# Altium schematic symbol library Regulator.SchLib: 250 symbols (part 6 of 6)
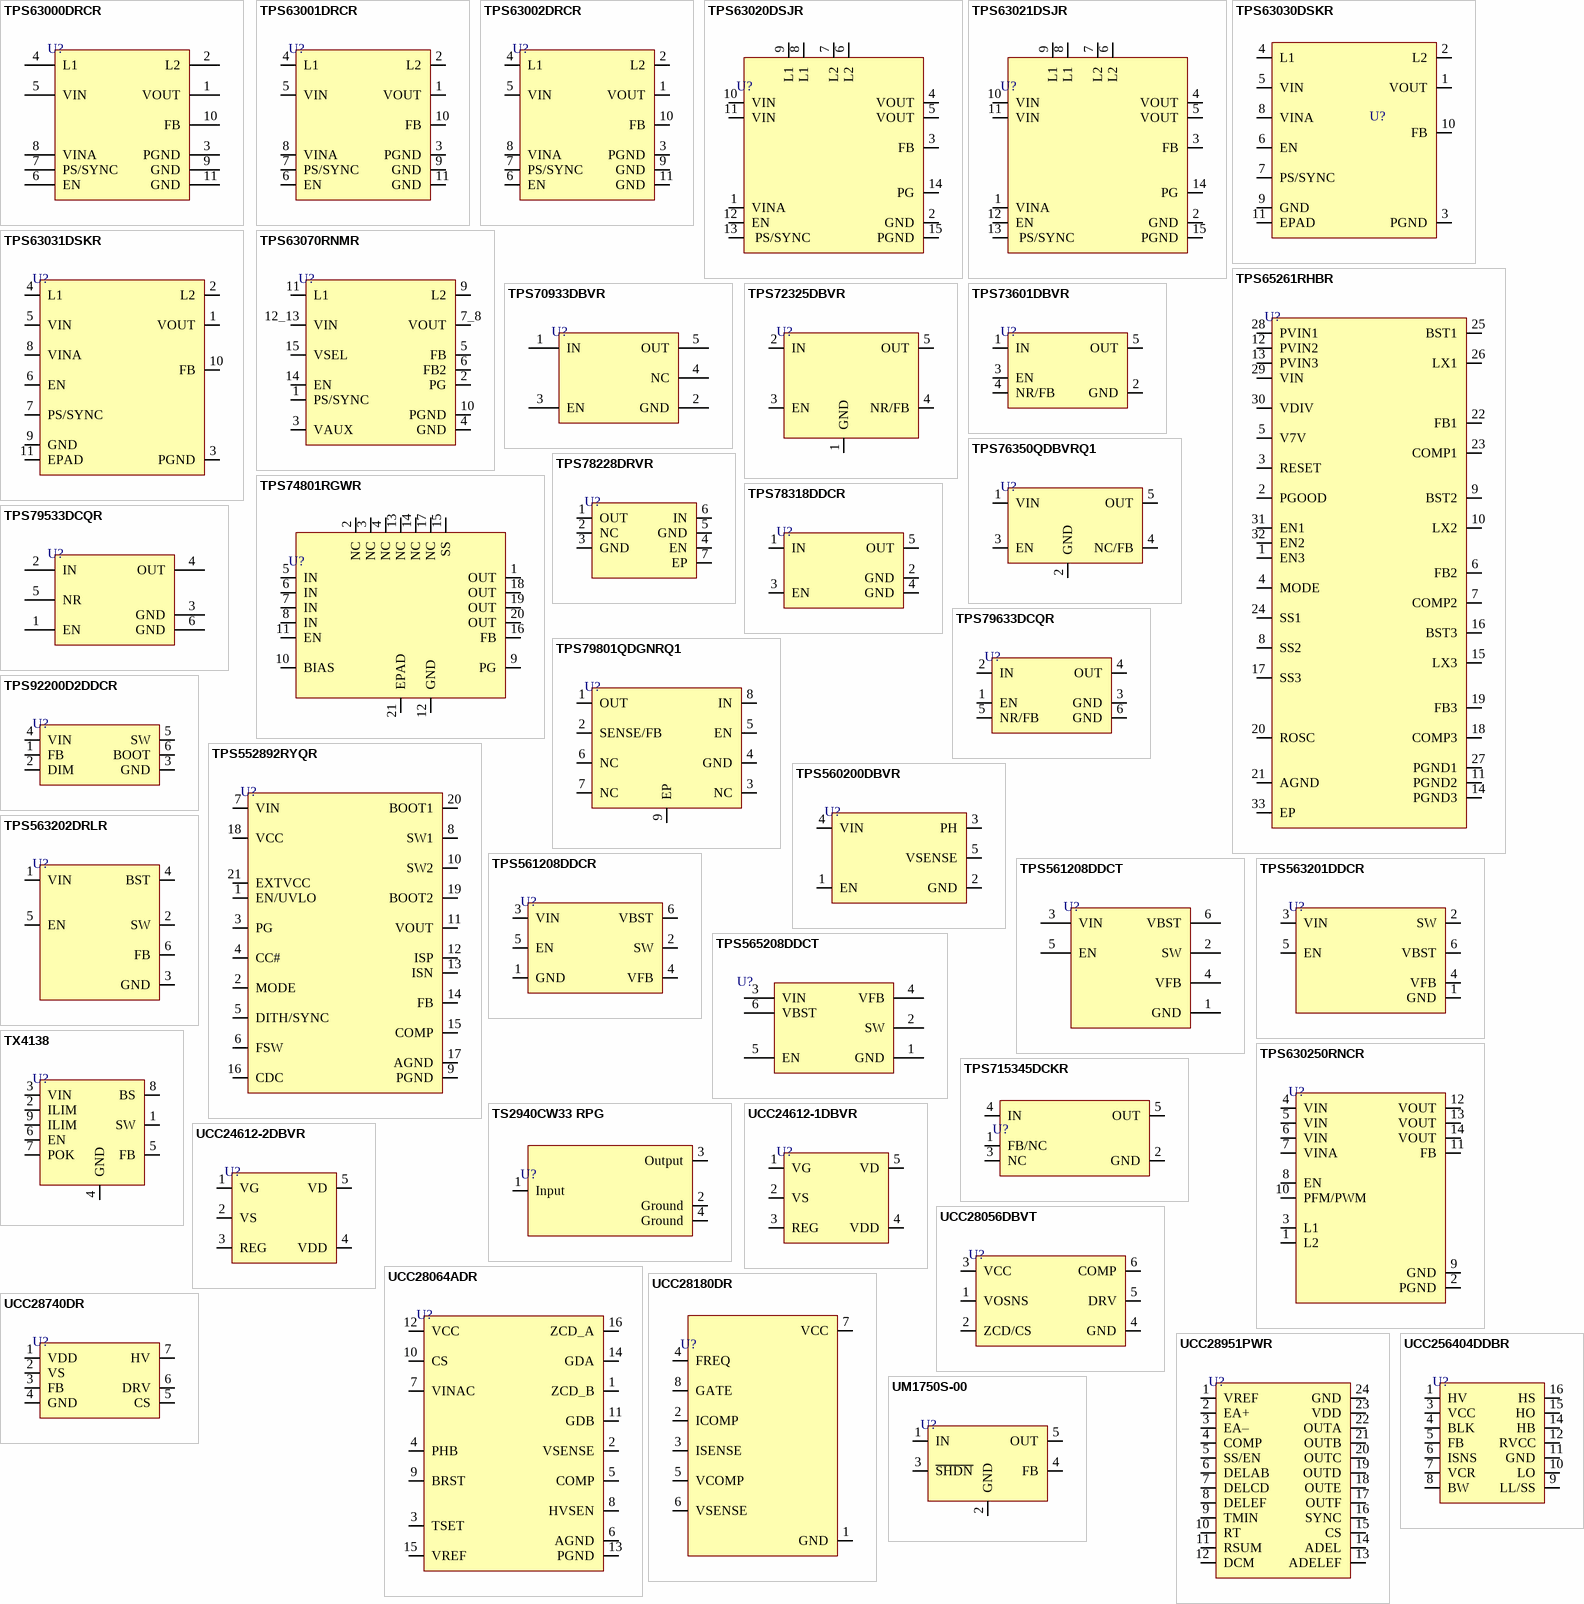
[diagram p11: symbols TPS63000DRCR to UM1750S-00]

## TPS63030DSKR
designator U?
IC REG BUCK-BST ADJ 900MA 10SON; Manufacturer: Texas Instruments; Manufacturer Part Number: TPS63030DSKR; Output Voltage: 5.5V; Output Current: 800mA; Min Input Voltage: 1.8V; Number of Outputs: 1; Switching Frequency: 2.4MHz; Synchronous Rectifier: Yes; Quiescent Current: 25uA; Output Type: Adjustable; Efficiency: 96%; Min Output Voltage: 1.2V; Topology: Buck-Boost; Output Configuration: Positive; Supply Current: 50uA; Supplier: Mouser; LCSC Part Number: C12462; RoHS: Yes; Item Type: IC; Stock: 10906; Pricing: 1=1.91, 10=1.64, 50=1.64, 100=1.41, 1000=1.01, 10000=0.886 (USD); Mounting Technology: Surface Mount; Case/Package: SON; Pins: 10; Min Operating Temperature: -40°C; Max Operating Temperature: 85°C; Packaging: Tape and Reel; Package Quantity: 3000; Max Output current: 800mA; Max Supply Voltage: 5.5V; Operating Supply Voltage: 5.5V; Series: -; Min Supply Voltage: 1.8V; Max Output Voltage: 5.5V; Radiation Hardening: No; Lead Free: Lead Free; RoHS Compliant: Yes; Reach SVHC Compliant: No; ComponentLink1URL: https://datasheet.ciiva.com/15113/getdatasheetpartid-188355-15113767.pdf?src-supplier=Verical; ComponentLink1Description: https://datasheet.ciiva.com/15113/getdatasheetpartid-188355-15113767.pdf?src-supplier=Verical; ComponentLink2URL: https://datasheet.ciiva.com/3221/tps63030-3221511.pdf?src-supplier=Avnet; ComponentLink2Description: https://datasheet.ciiva.com/3221/tps63030-3221511.pdf?src-supplier=Avnet
footprint SON-10-EP(2.5x2.5)
pins: 1 VOUT, 2 L2, 3 PGND, 4 L1, 5 VIN, 6 EN, 7 PS/SYNC, 8 VINA, 9 GND, 10 FB, 11 EPAD

## TPS63031DSKR
designator U?
IC REG BUCK BST 3.3V 0.9A 10SON; Manufacturer: Texas Instruments; Manufacturer Part Number: TPS63031DSKR; Supplier: Digikey; LCSC Part Number: 296-39461-1-ND; RoHS: Yes; Item Type: IC; Stock: 6304; Pricing: 1=2.06, 10=1.847, 25=1.7424, 100=1.4844, 250=1.3938, 500=1.21958, 1000=1.0105 (USD); ComponentLink1URL: https://datasheet.ciiva.com/2034/tps63030-2034702.pdf?src-supplier=Digikey; ComponentLink1Description: https://datasheet.ciiva.com/2034/tps63030-2034702.pdf?src-supplier=Digikey; ComponentLink2URL: https://datasheet.ciiva.com/3221/tps63030-3221513.pdf?src-supplier=Avnet; ComponentLink2Description: https://datasheet.ciiva.com/3221/tps63030-3221513.pdf?src-supplier=Avnet
footprint SON-10-EP(2.5x2.5)
pins: 1 VOUT, 2 L2, 3 PGND, 4 L1, 5 VIN, 6 EN, 7 PS/SYNC, 8 VINA, 9 GND, 10 FB, 11 EPAD

## TPS63070RNMR
designator U?
IC REG BCK BST ADJ 3.6A 15VQFN; Manufacturer: Texas Instruments; Manufacturer Part Number: TPS63070RNMR; Supplier: Mouser; Supplier Part Number: 595-TPS63070RNMR; RoHS: Yes; Category: Voltage Regulators - Switching; Stock: 55982; Pricing: 1=2.7, 10=2.29, 50=2.29, 100=1.99, 1000=1.43, 10000=1.21 (USD); ComponentLink1URL: http://www.ti.com/lit/ds/symlink/tps63070.pdf?src-supplier=Digi-Key; ComponentLink1Description: http://www.ti.com/lit/ds/symlink/tps63070.pdf?src-supplier=Digi-Key; ComponentLink2URL: http://www.ti.com/lit/ds/symlink/tps63070.pdf?src-supplier=Farnell; ComponentLink2Description: http://www.ti.com/lit/ds/symlink/tps63070.pdf?src-supplier=Farnell; LCSC Part Number: C109322; Item Type: IC
footprint VQFN-15-HR(2.5x3)
pins: 1 PS/SYNC, 2 PG, 3 VAUX, 4 GND, 5 FB, 6 FB2, 7_8 VOUT, 9 L2, 10 PGND, 11 L1, 12_13 VIN, 14 EN, 15 VSEL

## TPS65261RHBR
designator U?
IC REG BCK ADJ 3A/2A TRPL 32VQFN; Manufacturer: Texas Instruments; Manufacturer Part Number: TPS65261RHBR; Supplier: Mouser; LCSC Part Number: C138722; RoHS: Yes; Item Type: IC; Stock: 3449; Pricing: 1=2.78, 10=1.91, 50=1.91, 100=1.71, 1000=1.52, 10000=1.32 (USD); ComponentLink1URL: https://datasheet.ciiva.com/29735/tps65261-1-29735186.pdf?src-supplier=Digikey; ComponentLink1Description: https://datasheet.ciiva.com/29735/tps65261-1-29735186.pdf?src-supplier=Digikey
footprint 32-QFN (5x5)
pins: 1 EN3, 2 PGOOD, 3 RESET, 4 MODE, 5 V7V, 6 FB2, 7 COMP2, 8 SS2, 9 BST2, 10 LX2, 11 PGND2, 12 PVIN2, 13 PVIN3, 14 PGND3, 15 LX3, 16 BST3, 17 SS3, 18 COMP3, 19 FB3, 20 ROSC, 21 AGND, 22 FB1, 23 COMP1, 24 SS1, 25 BST1, 26 LX1, 27 PGND1, 28 PVIN1, 29 VIN, 30 VDIV, 31 EN1, 32 EN2, 33 EP

## TPS70933DBVR
designator U?
IC REG LINEAR 3.3V 150MA SOT23-5; Manufacturer: Texas Instruments; Manufacturer Part Number: TPS70933DBVR; Package: SOT-23-5; LCSC Part Number: C89347; Item Type: IC
footprint SOT-23-5
pins: 1 IN, 2 GND, 3 EN, 4 NC, 5 OUT

## TPS72325DBVR
designator U?
IC REG LIN -2.5V 200MA SOT23-5; Manufacturer: Texas Instruments; Manufacturer Part Number: TPS72325DBVR; Number of Outputs: 1; Max Power Dissipation: 560mW; Dropout Voltage: 280mV; Max Supply Voltage: -2.7V; Min Input Voltage: -10V; Min Current Limit: 300mA; Input Bias Current: 130uA; Polarity: Negative; Accuracy: 2%; Output Type: Fixed; Supplier: Mouser; LCSC Part Number: C69932; RoHS: Yes; Item Type: IC; Stock: 2906; Pricing: 1=2.91, 10=1.99, 50=1.99, 100=1.79, 1000=1.59, 10000=1.49 (USD); Case/Package: SOT-23; Pins: 5; Min Operating Temperature: -40°C; Max Operating Temperature: 125°C; Packaging: Tape and Reel; Output Voltage: -2.5V; Package Quantity: 3000; Output Current: 200mA; Max Output current: 200mA; Number of Regulators: 1; Min Output Voltage: -2.5V; Quiescent Current: 130uA; Max Output Voltage: -2.5V; Series: -; Nominal Output Voltage: -2.5V; Radiation Hardening: No; Lead Free: Lead Free; RoHS Compliant: Yes; Reach SVHC Compliant: No; ComponentLink1URL: http://www.mouser.com/ds/2/405/slvs346c-521947.pdf?src-supplier=Mouser; ComponentLink1Description: http://www.mouser.com/ds/2/405/slvs346c-521947.pdf?src-supplier=Mouser; ComponentLink2URL: http://components.arrow.com/part/dataview/40177093S9611537N7713?src-supplier=Arrow+Electronics; ComponentLink2Description: http://components.arrow.com/part/dataview/40177093S9611537N7713?src-supplier=Arrow+Electronics; ComponentLink3URL: http://www.ti.com/general/docs/lit/getliterature.tsp?genericPartNumber=TPS723&amp;&amp;fileType=pdf&src-supplier=Farnell; ComponentLink3Description: http://www.ti.com/general/docs/lit/getliterature.tsp?genericPartNumber=TPS723&amp;&amp;fileType=pdf&src-supplier=Farnell; ComponentLink4URL: http://www.ti.com/general/docs/lit/getliterature.tsp?genericPartNumber=TPS723&amp;&amp;fileType=pdf&src-supplier=Element14; ComponentLink4Description: http://www.ti.com/general/docs/lit/getliterature.tsp?genericPartNumber=TPS723&amp;&amp;fileType=pdf&src-supplier=Element14; ComponentLink5URL: http://www.ti.com/lit/ds/symlink/tps723.pdf?src-supplier=Digikey; ComponentLink5Description: http://www.ti.com/lit/ds/symlink/tps723.pdf?src-supplier=Digikey; ComponentLink6URL: http://www.ti.com/general/docs/suppproductinfo.tsp?distId=10&amp;gotoUrl=http%3A%2F%2Fwww.ti.com%2Flit%2Fgpn%2Ftps723&src-supplier=Digikey; ComponentLink6Description: http://www.ti.com/general/docs/suppproductinfo.tsp?distId=10&amp;gotoUrl=http%3A%2F%2Fwww.ti.com%2Flit%2Fgpn%2Ftps723&src-supplier=Digikey; ComponentLink7URL: http://www.ti.com/general/docs/lit/getliterature.tsp?genericPartNumber=TPS723&amp;&amp;fileType=pdf&src-supplier=Newark; ComponentLink7Description: http://www.ti.com/general/docs/lit/getliterature.tsp?genericPartNumber=TPS723&amp;&amp;fileType=pdf&src-supplier=Newark; ComponentLink8URL: http://www.ti.com/general/docs/lit/getliterature.tsp?genericPartNumber=TPS723&&fileType=pdf&src-supplier=Avnet; ComponentLink8Description: http://www.ti.com/general/docs/lit/getliterature.tsp?genericPartNumber=TPS723&&fileType=pdf&src-supplier=Avnet
footprint SOT-23-5
pins: 1 GND, 2 IN, 3 EN, 4 NR/FB, 5 OUT

## TPS73601DBVR
designator U?
IC REG LIN POS ADJ 400MA SOT23-5; Manufacturer: Texas Instruments; Manufacturer Part Number: TPS73601DBVR; Supplier: Mouser; Supplier Part Number: 595-TPS73601DBVR; RoHS: Yes; Category: Voltage Regulators - Linear; Stock: 2988; Pricing: 1=1.44, 10=1.25, 50=1.25, 100=0.966, 1000=0.655, 10000=0.621 (USD); ComponentLink1URL: https://datasheet.ciiva.com/22700/1831172-22700145.pdf?src-supplier=Element14; ComponentLink1Description: https://datasheet.ciiva.com/22700/1831172-22700145.pdf?src-supplier=Element14; ComponentLink2URL: https://datasheet.ciiva.com/41462/001015018-da-01-en-ic-reg-ldo-adj-0-tps73601dbvr-sot-5-tid-41462863.pdf?src-supplier=Conrad; ComponentLink2Description: https://datasheet.ciiva.com/41462/001015018-da-01-en-ic-reg-ldo-adj-0-tps73601dbvr-sot-5-tid-41462863.pdf?src-supplier=Conrad; LCSC Part Number: C59200; Item Type: IC
footprint SOT-23-5
pins: 1 IN, 2 GND, 3 EN, 4 NR/FB, 5 OUT

## TPS74801RGWR
designator U?
IC REG LIN POS ADJ 1.5A 20VQFN; Manufacturer: Texas Instruments; Manufacturer Part Number: TPS74801RGWR; Supplier: Mouser; LCSC Part Number: C129193; RoHS: Yes; Item Type: IC; Stock: 12482; Pricing: 1=1.87, 10=1.33, 50=1.33, 100=1.19, 1000=1.04, 10000=1.03 (USD); Length: 5mm; Width: 5mm; Height: 1mm; Thickness: 900um; ComponentLink1URL: https://datasheet.ciiva.com/4885/sbvs074j-203573-4885874.pdf?src-supplier=Mouser; ComponentLink1Description: https://datasheet.ciiva.com/4885/sbvs074j-203573-4885874.pdf?src-supplier=Mouser; ComponentLink2URL: https://datasheet.ciiva.com/41462/001015037-da-01-en-ic-reg-ldo-adj-tps74801rgwr-vqfn-20-tid-41462882.pdf?src-supplier=Conrad; ComponentLink2Description: https://datasheet.ciiva.com/41462/001015037-da-01-en-ic-reg-ldo-adj-tps74801rgwr-vqfn-20-tid-41462882.pdf?src-supplier=Conrad; ComponentLink3URL: https://datasheet.ciiva.com/14278/tps74801-14278399.pdf?src-supplier=Avnet; ComponentLink3Description: https://datasheet.ciiva.com/14278/tps74801-14278399.pdf?src-supplier=Avnet; ComponentLink4URL: https://datasheet.ciiva.com/31402/tps74801-31402076.pdf?src-supplier=Farnell; ComponentLink4Description: https://datasheet.ciiva.com/31402/tps74801-31402076.pdf?src-supplier=Farnell; ComponentLink5URL: https://datasheet.ciiva.com/2044/tps74801-2044836.pdf?src-supplier=Digikey; ComponentLink5Description: https://datasheet.ciiva.com/2044/tps74801-2044836.pdf?src-supplier=Digikey; ComponentLink6URL: https://datasheet.ciiva.com/2044/tps74801-2044837.pdf?src-supplier=Digikey; ComponentLink6Description: https://datasheet.ciiva.com/2044/tps74801-2044837.pdf?src-supplier=Digikey; ComponentLink7URL: https://datasheet.ciiva.com/2044/tps74801-2044838.pdf?src-supplier=Digikey; ComponentLink7Description: https://datasheet.ciiva.com/2044/tps74801-2044838.pdf?src-supplier=Digikey
footprint 20-VQFN (5x5)
pins: 1 OUT, 2 NC, 3 NC, 4 NC, 5 IN, 6 IN, 7 IN, 8 IN, 9 PG, 10 BIAS, 11 EN, 12 GND, 13 NC, 14 NC, 15 SS, 16 FB, 17 NC, 18 OUT, 19 OUT, 20 OUT, 21 EPAD

## TPS76350QDBVRQ1
designator U?
IC REG LINEAR 5V 150MA SOT23-5; Manufacturer: Texas Instruments; Manufacturer Part Number: TPS76350QDBVRQ1; Dropout Voltage: 180mV; Number of Outputs: 1; Max Power Dissipation: 555mW; Max Supply Voltage: 10V; Min Input Voltage: 2.7V; Min Current Limit: 500mA; Input Bias Current: 85uA; Reference Voltage: 1.192V; Polarity: Positive; Quiescent Current: 80uA; Output Voltage Accuracy: 3%; Output Type: Fixed; Supplier: Mouser; Supplier Part Number: 595-TPS76350QDBVRQ1; RoHS: Yes; Category: Voltage Regulators - Linear; Stock: 7424; Pricing: 1=1.15, 10=1.03, 50=1.03, 100=0.81, 1000=0.528, 10000=0.451 (USD); Case/Package: SOT-23-5; Pins: 5; Min Operating Temperature: -40°C; Max Operating Temperature: 125°C; Package Quantity: 3000; Packaging: Tape and Reel; Output Voltage: 5V; Output Current: 150mA; Max Output current: 150mA; Number of Regulators: 1; Power Dissipation: 555mW; Accuracy: 3%; Max Output Voltage: 5V; Min Output Voltage: 5V; Series: Automotive, AEC-Q100; Length: 2.9mm; Width: 1.6mm; Height: 1.45mm; Thickness: 1.2mm; Radiation Hardening: No; Lead Free: Lead Free; RoHS Compliant: Yes; ComponentLink1URL: https://datasheet.ciiva.com/2044/tps76318-q1-2044688.pdf?src-supplier=Digikey; ComponentLink1Description: https://datasheet.ciiva.com/2044/tps76318-q1-2044688.pdf?src-supplier=Digikey; Item Type: IC
footprint SOT-23-5
pins: 1 VIN, 2 GND, 3 EN, 4 NC/FB, 5 OUT

## TPS78228DRVR
designator U?
IC REG LINEAR 2.8V 150MA 6-WSON; Manufacturer: Texas Instruments; Manufacturer Part Number: TPS78228DRVR; Supplier: Mouser; LCSC Part Number: C2876267; RoHS: Yes; Item Type: IC; Stock: 2455; Pricing: 1=0.8, 10=0.574, 50=0.516, 100=0.453, 1000=0.39, 10000=0.303 (USD); ComponentLink1URL: https://datasheet.ciiva.com/41462/001015109-da-01-en-ic-reg-ldo-2-8v-tps78228drvr-wson-6-tid-41462955.pdf?src-supplier=Conrad; ComponentLink1Description: https://datasheet.ciiva.com/41462/001015109-da-01-en-ic-reg-ldo-2-8v-tps78228drvr-wson-6-tid-41462955.pdf?src-supplier=Conrad; ComponentLink2URL: https://datasheet.ciiva.com/2052/tps782-2052513.pdf?src-supplier=Digikey; ComponentLink2Description: https://datasheet.ciiva.com/2052/tps782-2052513.pdf?src-supplier=Digikey; ComponentLink3URL: https://datasheet.ciiva.com/2052/tps782-2052514.pdf?src-supplier=Digikey; ComponentLink3Description: https://datasheet.ciiva.com/2052/tps782-2052514.pdf?src-supplier=Digikey; ComponentLink4URL: https://datasheet.ciiva.com/2052/tps782-2052515.pdf?src-supplier=Digikey; ComponentLink4Description: https://datasheet.ciiva.com/2052/tps782-2052515.pdf?src-supplier=Digikey
footprint 6-WSON (2x2) (TPS60150DRVR)
pins: 1 OUT, 2 NC, 3 GND, 4 EN, 5 GND, 6 IN, 7 EP

## TPS78318DDCR
designator U?
IC REG LINEAR 1.8V 150MA SOT23-5; Manufacturer: Texas Instruments; Manufacturer Part Number: TPS78318DDCR; Supplier: Mouser; LCSC Part Number: C2867196; RoHS: Yes; Item Type: IC; Stock: 3326; Pricing: 1=0.84, 10=0.739, 50=0.739, 100=0.567, 1000=0.358, 10000=0.291 (USD); ComponentLink1URL: https://datasheet.ciiva.com/12217/tps78318-224218-12217493.pdf?src-supplier=Mouser; ComponentLink1Description: https://datasheet.ciiva.com/12217/tps78318-224218-12217493.pdf?src-supplier=Mouser
footprint SOT-23-5
pins: 1 IN, 2 GND, 3 EN, 4 GND, 5 OUT

## TPS79533DCQR
designator U?
IC REG LIN 3.3V 500MA SOT223-6; Manufacturer: Texas Instruments; Manufacturer Part Number: TPS79533DCQR; Package: SOT-223-6; LCSC Part Number: C28669; Item Type: IC
footprint SOT-223-6_
pins: 1 EN, 2 IN, 3 GND, 4 OUT, 5 NR, 6 GND

## TPS79633DCQR
designator U?
IC REG LINEAR 3.3V 1A SOT223-6; Manufacturer: Texas Instruments; Manufacturer Part Number: TPS79633DCQR; Supplier: Mouser; Supplier Part Number: 595-TPS79633DCQR; RoHS: Yes; Category: Voltage Regulators - Linear; Stock: 3089; Pricing: 1=3.24, 10=2.75, 50=2.75, 100=2.39, 1000=1.72, 10000=1.56 (USD); Length: 6.5mm; Width: 3.5mm; Thickness: 1.6mm; ComponentLink1URL: https://datasheet.ciiva.com/2045/tps79601-2045264.pdf?src-supplier=Digi-Key; ComponentLink1Description: https://datasheet.ciiva.com/2045/tps79601-2045264.pdf?src-supplier=Digi-Key; ComponentLink2URL: https://datasheet.ciiva.com/22704/1846966-22704703.pdf?src-supplier=Element14; ComponentLink2Description: https://datasheet.ciiva.com/22704/1846966-22704703.pdf?src-supplier=Element14; ComponentLink3URL: https://datasheet.ciiva.com/41462/001015136-da-01-en-ic-reg-ldo-3-3v-1-tps79633dcqr-sot-6-tid-41462982.pdf?src-supplier=Conrad; ComponentLink3Description: https://datasheet.ciiva.com/41462/001015136-da-01-en-ic-reg-ldo-3-3v-1-tps79633dcqr-sot-6-tid-41462982.pdf?src-supplier=Conrad; LCSC Part Number: C485803; Item Type: IC
footprint SOT-223-6_
pins: 1 EN, 2 IN, 3 GND, 4 OUT, 5 NR/FB, 6 GND

## TPS79801QDGNRQ1
designator U?
IC REG LIN POS ADJ 50MA 8HVSSOP; Manufacturer: Texas Instruments; Manufacturer Part Number: TPS79801QDGNRQ1; Supplier: Mouser; LCSC Part Number: C129345; RoHS: Yes; Item Type: IC; Stock: 16600; Pricing: 1=2.11, 10=1.42, 50=1.42, 100=1.27, 1000=1.12, 10000=1.04 (USD); ComponentLink1URL: https://datasheet.ciiva.com/14277/tps79801-q1-14277825.pdf?src-supplier=Farnell; ComponentLink1Description: https://datasheet.ciiva.com/14277/tps79801-q1-14277825.pdf?src-supplier=Farnell; ComponentLink2URL: https://datasheet.ciiva.com/14277/tps79801-q1-14277825.pdf?src-supplier=Avnet; ComponentLink2Description: https://datasheet.ciiva.com/14277/tps79801-q1-14277825.pdf?src-supplier=Avnet; ComponentLink3URL: https://datasheet.ciiva.com/2043/tps79801-q1-2043796.pdf?src-supplier=Digikey; ComponentLink3Description: https://datasheet.ciiva.com/2043/tps79801-q1-2043796.pdf?src-supplier=Digikey; ComponentLink4URL: https://datasheet.ciiva.com/4887/slvs822d-121029-4887163.pdf?src-supplier=Mouser; ComponentLink4Description: https://datasheet.ciiva.com/4887/slvs822d-121029-4887163.pdf?src-supplier=Mouser; ComponentLink5URL: https://datasheet.ciiva.com/2043/tps79801-q1-2043797.pdf?src-supplier=Digikey; ComponentLink5Description: https://datasheet.ciiva.com/2043/tps79801-q1-2043797.pdf?src-supplier=Digikey; ComponentLink6URL: https://datasheet.ciiva.com/2043/tps79801-q1-2043798.pdf?src-supplier=Digikey; ComponentLink6Description: https://datasheet.ciiva.com/2043/tps79801-q1-2043798.pdf?src-supplier=Digikey; ComponentLink7URL: https://datasheet.ciiva.com/14277/tps79801-q1-14277829.pdf?src-supplier=Avnet; ComponentLink7Description: https://datasheet.ciiva.com/14277/tps79801-q1-14277829.pdf?src-supplier=Avnet; ComponentLink8URL: https://datasheet.ciiva.com/28653/1707901-28653271.pdf?src-supplier=Element14; ComponentLink8Description: https://datasheet.ciiva.com/28653/1707901-28653271.pdf?src-supplier=Element14; ComponentLink9URL: https://datasheet.ciiva.com/46383/1707901-46383688.pdf?src-supplier=Element14; ComponentLink9Description: https://datasheet.ciiva.com/46383/1707901-46383688.pdf?src-supplier=Element14; ComponentLink10URL: https://datasheet.ciiva.com/7993/1707901-7993240.pdf?src-supplier=Element14; ComponentLink10Description: https://datasheet.ciiva.com/7993/1707901-7993240.pdf?src-supplier=Element14
footprint 8-HVSSOP
pins: 1 OUT, 2 SENSE/FB, 3 NC, 4 GND, 5 EN, 6 NC, 7 NC, 8 IN, 9 EP

## TPS92200D2DDCR
designator U?
IC LED DRV RGLTR PWM SOT23-THIN; Manufacturer: Texas Instruments; Manufacturer Part Number: TPS92200D2DDCR; Supplier: Mouser; LCSC Part Number: C2865497; RoHS: Yes; Item Type: IC; Stock: 5302; Pricing: 1=0.59, 10=0.414, 50=0.371, 100=0.323, 1000=0.276, 10000=0.243 (USD); Pins: 6NUMBER; Length: 2.9mm; Width: 1.6mm; Height: 1.1mm; Thickness: 870um
footprint SOT-23-6
pins: 1 FB, 2 DIM, 3 GND, 4 VIN, 5 SW, 6 BOOT

## TPS552892RYQR
designator U?
IC REG BUCK BOOST PROG 5A 21VQFN; Manufacturer: Texas Instruments; Manufacturer Part Number: TPS552892RYQR; Topology: 6153TopologyType; Supplier: Mouser; LCSC Part Number: C19272254; RoHS: No; Item Type: IC; Stock: 3785; Pricing: 1=6.8, 10=4.8, 50=4.8, 100=4.37, 1000=3.34, 10000=3.23 (USD); Pins: 21NUMBER; Length: 5mm; Width: 3mm; Thickness: 900um
footprint VQFN-HR-21(3x5)
pins: 1 EN/UVLO, 2 MODE, 3 PG, 4 CC#, 5 DITH/SYNC, 6 FSW, 7 VIN, 8 SW1, 9 PGND, 10 SW2, 11 VOUT, 12 ISP, 13 ISN, 14 FB, 15 COMP, 16 CDC, 17 AGND, 18 VCC, 19 BOOT2, 20 BOOT1, 21 EXTVCC

## TPS560200DBVR
designator U?
IC REG BUCK ADJ 500MA SOT23-5; Manufacturer: Texas Instruments; Manufacturer Part Number: TPS560200DBVR; Supplier: Mouser; LCSC Part Number: C83671; RoHS: Yes; Item Type: IC; Stock: 36088; Pricing: 1=0.72, 10=0.632, 50=0.632, 100=0.485, 1000=0.307, 10000=0.249 (USD); ComponentLink1URL: https://datasheet.ciiva.com/30031/tps560200-30031575.pdf?src-supplier=Avnet; ComponentLink1Description: https://datasheet.ciiva.com/30031/tps560200-30031575.pdf?src-supplier=Avnet
footprint SOT-23-5
pins: 1 EN, 2 GND, 3 PH, 4 VIN, 5 VSENSE

## TPS561208DDCR
designator U?
IC REG BUCK ADJ 1A SOT23-6; Manufacturer: Texas Instruments; Manufacturer Part Number: TPS561208DDCR; Output Type: Adjustable; Output Configuration: Positive; Number of Outputs: 1; Min Input Voltage: 4.5V; Max Supply Voltage: 17V; Min Output Voltage: 760mV; Max Output Voltage: 7V; Switching Frequency: 580kHz; Synchronous Rectifier: Yes; Supplier: Mouser; Supplier Part Number: 595-TPS561208DDCR; RoHS: Yes; Category: Voltage Regulators - Switching; Stock: 12052; Pricing: 1=0.6, 10=0.499, 50=0.499, 100=0.378, 1000=0.256, 10000=0.207 (USD); Mounting Technology: Surface Mount; Case/Package: SOT-23-6; Min Operating Temperature: -40°C; Max Operating Temperature: 85°C; Packaging: Cut Tape; Output Current: 1A; Series: SWIFT™; RoHS Compliant: Yes; ComponentLink1URL: http://www.ti.com/lit/ds/symlink/tps561201.pdf?src-supplier=Digi-Key; ComponentLink1Description: http://www.ti.com/lit/ds/symlink/tps561201.pdf?src-supplier=Digi-Key; LCSC Part Number: C138335; Item Type: IC
footprint TSOT-23-6
pins: 1 GND, 2 SW, 3 VIN, 4 VFB, 5 EN, 6 VBST

## TPS561208DDCT
designator U?
IC REG BUCK ADJ 1A SOT23; Manufacturer: Texas Instruments; Manufacturer Part Number: TPS561208DDCT; Manufacturer Lifecycle Status: ACTIVE; Description: Synchronous Step-Down Voltage Regulator 4.5V to 17V Input 1A 7V Output 6-Pin SOT-23 T/R; Max Duty Cycle: 75%; Max Junction Temperature (Tj): 125°C; Max Supply Voltage: 17V; Min Supply Voltage: 4.5V; Nominal Supply Current: 590µA; Number of Outputs: 1; Output Voltage: 7V; Switching Frequency: 580kHz; Supplier: DigiKey; Supplier Part Number: 296-46929-1-ND; RoHS: Compliant; Item Type: IC; Stock: 3132; Pricing: 1=1.15, 10=0.835, 25=0.7544, 100=0.6666 (USD); Height: 1.1mm; Length: 2.9mm; Lifecycle Status: Production; Max Operating Temperature: 85°C; Min Operating Temperature: -40°C; Pins: 6; Output Current: 1A; Packaging: Cut Tape; Schedule B: 8542390000, 8542390000|8542390000|8542390000|8542390000|8542390000; Thickness: 870µm; Topology: Buck; Width: 1.6mm; ComponentLink1URL: https://sigma.octopart.com:443/180581133/technical_drawing/Texas-Instruments-TPS561208DDCT.pdf?src-supplier=Texas+Instruments; ComponentLink1Description: https://sigma.octopart.com:443/180581133/technical_drawing/Texas-Instruments-TPS561208DDCT.pdf?src-supplier=Texas+Instruments; ComponentLink2URL: https://octopart.com:443/opatz8j6/c1?t=OPpNtVuMsozFn5Dg9bZMgA_UaVD2Qr2nRGRA8JGJMtNB-yNNjbN_hFWprnCyTFUqcKojwus-rIlB96Rgc_I1h4LQ-l5e0vyILu0tGGTToVJ-QRVZb0pCUwQhVUDPy0-CvP1ht0c1cXJ3Sr7WgqK1UsU5w63ptwAhQ-0ZddfRDQucVg8Znc1DvW9ynNozX86FF1wkoVlvcNoMN2rmPBxFm3beA_gkeoXoGp9g0x4IRT62V5MrL5k-5jiIt-AHfRa2t-eBI923_COYlONAQYZtP_bDq9VMgYP188zpYjA3HB_Qyho-7YGpdf685eo_bnpOWPrlTezN9E82-0GS_8HB_TDJp-0TwIOCY6k4ASwGcq1NCIX6B1fZJTC8xMVmgOpvSk8ubSdIbw&src-supplier=Texas+Instruments; ComponentLink2Description: https://octopart.com:443/opatz8j6/c1?t=OPpNtVuMsozFn5Dg9bZMgA_UaVD2Qr2nRGRA8JGJMtNB-yNNjbN_hFWprnCyTFUqcKojwus-rIlB96Rgc_I1h4LQ-l5e0vyILu0tGGTToVJ-QRVZb0pCUwQhVUDPy0-CvP1ht0c1cXJ3Sr7WgqK1UsU5w63ptwAhQ-0ZddfRDQucVg8Znc1DvW9ynNozX86FF1wkoVlvcNoMN2rmPBxFm3beA_gkeoXoGp9g0x4IRT62V5MrL5k-5jiIt-AHfRa2t-eBI923_COYlONAQYZtP_bDq9VMgYP188zpYjA3HB_Qyho-7YGpdf685eo_bnpOWPrlTezN9E82-0GS_8HB_TDJp-0TwIOCY6k4ASwGcq1NCIX6B1fZJTC8xMVmgOpvSk8ubSdIbw&src-supplier=Texas+Instruments; ComponentLink3URL: https://sigma.octopart.com:443/179311906/technical_drawing/Texas-Instruments-TPS561208DDCT.pdf?src-supplier=Texas+Instruments; ComponentLink3Description: https://sigma.octopart.com:443/179311906/technical_drawing/Texas-Instruments-TPS561208DDCT.pdf?src-supplier=Texas+Instruments; ComponentLink4URL: https://sigma.octopart.com:443/159779760/technical_drawing/Texas-Instruments-TPS561208DDCT.pdf?src-supplier=Texas+Instruments; ComponentLink4Description: https://sigma.octopart.com:443/159779760/technical_drawing/Texas-Instruments-TPS561208DDCT.pdf?src-supplier=Texas+Instruments; ComponentLink5URL: https://sigma.octopart.com:443/149167535/technical_drawing/Texas-Instruments-TPS561208DDCT.pdf?src-supplier=Texas+Instruments; ComponentLink5Description: https://sigma.octopart.com:443/149167535/technical_drawing/Texas-Instruments-TPS561208DDCT.pdf?src-supplier=Texas+Instruments; ComponentLink6URL: https://sigma.octopart.com:443/49250152/technical_drawing/Texas-Instruments-TPS561208DDCT.pdf?src-supplier=Texas+Instruments; ComponentLink6Description: https://sigma.octopart.com:443/49250152/technical_drawing/Texas-Instruments-TPS561208DDCT.pdf?src-supplier=Texas+Instruments; ComponentLink7URL: https://datasheet.octopart.com:443/TPS561208DDCT-Texas-Instruments-datasheet-149157265.pdf?src-supplier=Upverter; ComponentLink7Description: https://datasheet.octopart.com:443/TPS561208DDCT-Texas-Instruments-datasheet-149157265.pdf?src-supplier=Upverter; ComponentLink8URL: https://datasheet.octopart.com:443/TPS561208DDCT-Texas-Instruments-datasheet-83961351.pdf?src-supplier=Newark; ComponentLink8Description: https://datasheet.octopart.com:443/TPS561208DDCT-Texas-Instruments-datasheet-83961351.pdf?src-supplier=Newark; ComponentLink9URL: https://datasheet.octopart.com:443/TPS561208DDCT-Texas-Instruments-datasheet-165804780.pdf?src-supplier=LCSC; ComponentLink9Description: https://datasheet.octopart.com:443/TPS561208DDCT-Texas-Instruments-datasheet-165804780.pdf?src-supplier=LCSC; ComponentLink10URL: http://sigma.octopart.com:80/conflict_mineral_statement/Texas-Instruments-company-63.pdf?src-supplier=Compliance+Statements; ComponentLink10Description: http://sigma.octopart.com:80/conflict_mineral_statement/Texas-Instruments-company-63.pdf?src-supplier=Compliance+Statements; ComponentLink11URL: http://sigma.octopart.com:80/reach_statement/Texas-Instruments-company-64.pdf?src-supplier=Compliance+Statements; ComponentLink11Description: http://sigma.octopart.com:80/reach_statement/Texas-Instruments-company-64.pdf?src-supplier=Compliance+Statements
footprint SOT-23-6 THIN
pins: 1 GND, 2 SW, 3 VIN, 4 VFB, 5 EN, 6 VBST

## TPS563201DDCR
designator U?
IC REG BUCK ADJ 3A TSOT23-6; Manufacturer: Texas Instruments; Manufacturer Part Number: TPS563201DDCR; Number of Outputs: 1; Min Input Voltage: 4.5V; Max Input Voltage: 17V; Min Output Voltage: 768mV; Max Output Voltage: 7V; Switching Frequency: 580kHz; Synchronous Rectifier: Yes; Quiescent Current: 400uA; Output Type: Adjustable; Output Configuration: Positive; Supplier 1: Digi-Key; Stock 1: 0; Pricing 1: 1=0.92, 10=0.812, 25=0.7628, 100=0.5781, 250=0.492, 500=0.4674, 1000=0.3567 (USD); Mount: Surface Mount; Case/Package: SOT-23-6; Number of Pins: 6; Min Operating Temperature: -40°C; Max Operating Temperature: 125°C; Packaging: Tape and Reel; Output Current: 3A; Lead Free: Lead Free; ComponentLink1URL: http://www.ti.com/lit/ds/symlink/tps563201.pdf?src-supplier=Digi-Key; ComponentLink1Description: http://www.ti.com/lit/ds/symlink/tps563201.pdf?src-supplier=Digi-Key; ComponentLink2URL: http://www.ti.com/general/docs/suppproductinfo.tsp?distId=10&amp;gotoUrl=http%3A%2F%2Fwww.ti.com%2Flit%2Fgpn%2Ftps563201&src-supplier=Digi-Key; ComponentLink2Description: http://www.ti.com/general/docs/suppproductinfo.tsp?distId=10&amp;gotoUrl=http%3A%2F%2Fwww.ti.com%2Flit%2Fgpn%2Ftps563201&src-supplier=Digi-Key; ComponentLink3URL: http://www.ti.com/lit/gpn/tps563201?src-supplier=Mouser; ComponentLink3Description: http://www.ti.com/lit/gpn/tps563201?src-supplier=Mouser; Supplier Part Number 1: 296-47238-6-ND; LCSC Part Number: C116592; Item Type: IC
footprint SOT-23-6 THIN
pins: 1 GND, 2 SW, 3 VIN, 4 VFB, 5 EN, 6 VBST

## TPS563202DRLR
designator U?
IC REG BUCK ADJ 3A SOT563; Manufacturer: Texas Instruments; Manufacturer Part Number: TPS563202DRLR; Number of Channels: 1NUMBER; Supplier: Mouser; LCSC Part Number: C1513007; RoHS: Yes; Item Type: IC; Stock: 5123; Pricing: 1=0.29, 10=0.174, 50=0.174, 100=0.131, 1000=0.125, 10000=0.109 (USD); Pins: 6NUMBER; Length: 1.6mm; Width: 1.2mm; Height: 600um; Thickness: 550um
footprint SOT-563
pins: 1 VIN, 2 SW, 3 GND, 4 BST, 5 EN, 6 FB

## TPS565208DDCT
designator U?
IC REG BUCK ADJ 5A TSOT23-6; Manufacturer: Texas Instruments; Manufacturer Part Number: TPS565208DDCT; Output Type: Adjustable; Output Configuration: Positive; Number of Outputs: 1; Min Input Voltage: 4.5V; Max Input Voltage: 17V; Min Output Voltage: 760mV; Max Output Voltage: 7V; Switching Frequency: 500kHz; Synchronous Rectifier: Yes; Supplier 1: Digi-Key; Stock 1: 1895; Pricing 1: 1=1.75, 10=1.576, 25=1.4868, 100=1.2666 (USD); Mount: Surface Mount; Case/Package: SOT-23-6; Min Operating Temperature: -40°C; Max Operating Temperature: 125°C; Packaging: Tape and Reel; Output Current: 5A; RoHS Compliant: Yes; ComponentLink1URL: http://www.ti.com/lit/ds/symlink/tps565208.pdf?src-supplier=Farnell; ComponentLink1Description: http://www.ti.com/lit/ds/symlink/tps565208.pdf?src-supplier=Farnell; ComponentLink2URL: http://www.ti.com/lit/ds/symlink/tps565208.pdf?src-supplier=Digi-Key; ComponentLink2Description: http://www.ti.com/lit/ds/symlink/tps565208.pdf?src-supplier=Digi-Key; ComponentLink3URL: http://www.ti.com/lit/ds/symlink/tps565208.pdf?src-supplier=Newark; ComponentLink3Description: http://www.ti.com/lit/ds/symlink/tps565208.pdf?src-supplier=Newark; Supplier Part Number 1: 296-47502-6-ND; LCSC Part Number: C2072024; Item Type: IC
footprint SOT-23-6
pins: 1 GND, 2 SW, 3 VIN, 4 VFB, 5 EN, 6 VBST

## TPS630250RNCR
designator U?
IC REG BCK BST ADJ 2A/4A 14VQFN; Manufacturer: Texas Instruments; Manufacturer Part Number: TPS630250RNCR; Supplier: Mouser; LCSC Part Number: C2071836; RoHS: Yes; Item Type: IC; Stock: 3196; Pricing: 1=2.28, 10=1.69, 50=1.54, 100=1.38, 1000=1.22, 10000=1.13 (USD); ComponentLink1URL: http://www.ti.com/general/docs/lit/getliterature.tsp?genericPartNumber=TPS630251&&fileType=pdf&src-supplier=Avnet; ComponentLink1Description: http://www.ti.com/general/docs/lit/getliterature.tsp?genericPartNumber=TPS630251&&fileType=pdf&src-supplier=Avnet; ComponentLink2URL: http://www.ti.com/lit/ds/symlink/tps630250.pdf?src-supplier=Digikey; ComponentLink2Description: http://www.ti.com/lit/ds/symlink/tps630250.pdf?src-supplier=Digikey; ComponentLink3URL: http://www.ti.com/general/docs/suppproductinfo.tsp?distId=10&amp;gotoUrl=http%3A%2F%2Fwww.ti.com%2Flit%2Fgpn%2Ftps630250&src-supplier=Digikey; ComponentLink3Description: http://www.ti.com/general/docs/suppproductinfo.tsp?distId=10&amp;gotoUrl=http%3A%2F%2Fwww.ti.com%2Flit%2Fgpn%2Ftps630250&src-supplier=Digikey
footprint 14-VQFN-HR (3x2.5)
pins: 1 L2, 2 PGND, 3 L1, 4 VIN, 5 VIN, 6 VIN, 7 VINA, 8 EN, 9 GND, 10 PFM/PWM, 11 FB, 12 VOUT, 13 VOUT, 14 VOUT

## TPS715345DCKR
designator U?
IC REG LINEAR 3.45V 50MA SC70-5; Manufacturer: Texas Instruments; Manufacturer Part Number: TPS715345DCKR; Number of Channels: 1NUMBER; Supplier: Mouser; LCSC Part Number: C473350; RoHS: Yes; Item Type: IC; Stock: 16749; Pricing: 1=0.53, 10=0.394, 50=0.394, 100=0.335, 1000=0.302, 10000=0.277 (USD); Thickness: 900um; ComponentLink1URL: https://datasheet.ciiva.com/7992/1854688-7992974.pdf?src-supplier=Element14; ComponentLink1Description: https://datasheet.ciiva.com/7992/1854688-7992974.pdf?src-supplier=Element14
footprint SC70-5
pins: 1 FB/NC, 2 GND, 3 NC, 4 IN, 5 OUT

## TS2940CW33 RPG
designator U?
IC REG LINEAR 3.3V 1A SOT223; Manufacturer: Taiwan Semiconductor; Manufacturer Part Number: TS2940CW33 RPG; Output Type: Fixed; Output Configuration: Positive; Number of Regulators: 1; Max Supply Voltage: 26V; Quiescent Current: 15mA; Max Supply Current: 110mA; Supplier: Digi-Key; Supplier Part Number: 1801-TS2940CW33RPGCT-ND; RoHS: Yes; Stock: 4100; Pricing: 1=1.12, 10=1.004, 25=0.9532, 100=0.7829, 250=0.7318, 500=0.6467, 1000=0.51056 (USD); Mounting Technology: Surface Mount; Case/Package: TO-261-4; Min Operating Temperature: -40°C; Max Operating Temperature: 125°C; Min Output Voltage: 3.3V; Output Current: 1A; Series: -; Packaging: Tape and Reel; RoHS Compliant: Yes; ComponentLink1URL: http://www.farnell.com/datasheets/2044143.pdf?src-supplier=Farnell; ComponentLink1Description: http://www.farnell.com/datasheets/2044143.pdf?src-supplier=Farnell; ComponentLink2URL: https://www.taiwansemi.com/products/datasheet/TS2940_D15.pdf?src-supplier=Digi-Key; ComponentLink2Description: https://www.taiwansemi.com/products/datasheet/TS2940_D15.pdf?src-supplier=Digi-Key; ComponentLink3URL: https://datasheet.octopart.com/TS2940CW33-RPG-Taiwan-Semiconductor-datasheet-62313027.pdf?src-supplier=TME; ComponentLink3Description: https://datasheet.octopart.com/TS2940CW33-RPG-Taiwan-Semiconductor-datasheet-62313027.pdf?src-supplier=TME; Item Type: IC
footprint SOT- 223
pins: 1 Input, 2 Ground, 3 Output, 4 Ground

## TX4138
designator U?
Step-down type SOIC-8-EP DC-DC Converters ROHS; Manufacturer: XDS; Manufacturer Part Number: TX4138; Item Type: IC; Package: SOIC-8-EP; LCSC Part Number: C329267; ComponentLink1Description: LCSC; ComponentLink1URL: https://www.lcsc.com/product-detail/DC-DC-Converters_XDS-TX4138_C329267.html
footprint 8-SOIC-EP
pins: 1 SW, 2 ILIM, 3 VIN, 4 GND, 5 FB, 6 EN, 7 POK, 8 BS, 9 ILIM

## UCC24612-1DBVR
designator U?
SYNC RECTIFIER FLYBACK; Manufacturer: Texas Instruments; Manufacturer Part Number: UCC24612-1DBVR; Item Type: IC; Supplier: Mouser; LCSC Part Number: C2657796; RoHS: Yes; Stock: 14678; Pricing: 1=0.92, 10=0.757, 50=0.757, 100=0.574, 1000=0.391, 10000=0.302 (USD); ComponentLink1URL: http://www.ti.com/general/docs/suppproductinfo.tsp?distId=10&amp;gotoUrl=http%3A%2F%2Fwww.ti.com%2Flit%2Fgpn%2Fucc24612&src-supplier=Digikey; ComponentLink1Description: http://www.ti.com/general/docs/suppproductinfo.tsp?distId=10&amp;gotoUrl=http%3A%2F%2Fwww.ti.com%2Flit%2Fgpn%2Fucc24612&src-supplier=Digikey
footprint SOT-23-5
pins: 1 VG, 2 VS, 3 REG, 4 VDD, 5 VD

## UCC24612-2DBVR
designator U?
SYNC RECTIFIER FLYBACK; Manufacturer: Texas Instruments; Manufacturer Part Number: UCC24612-2DBVR; Item Type: IC; Supplier: Mouser; LCSC Part Number: C471044; RoHS: Yes; Stock: 6284; Pricing: 1=0.92, 10=0.758, 50=0.758, 100=0.575, 1000=0.392, 10000=0.317 (USD); Pins: 5NUMBER; Length: 2.9mm; Width: 1.6mm; Height: 1.45mm; Thickness: 1.2mm; ComponentLink1URL: http://www.ti.com/general/docs/suppproductinfo.tsp?distId=10&amp;gotoUrl=http%3A%2F%2Fwww.ti.com%2Flit%2Fgpn%2Fucc24612&src-supplier=Digikey; ComponentLink1Description: http://www.ti.com/general/docs/suppproductinfo.tsp?distId=10&amp;gotoUrl=http%3A%2F%2Fwww.ti.com%2Flit%2Fgpn%2Fucc24612&src-supplier=Digikey
footprint SOT-23-5
pins: 1 VG, 2 VS, 3 REG, 4 VDD, 5 VD

## UCC28056DBVT
designator U?
IC PFC CTRLR TRANSITION SOT23-6; Manufacturer: Texas Instruments; Manufacturer Part Number: UCC28056DBVT; Package: SOT-23-6; LCSC Part Number: C2868631; Item Type: IC; ComponentLink1Description: LCSC; ComponentLink1URL: https://www.lcsc.com/product-detail/AC-DC-Controllers-Regulators_Texas-Instruments-UCC28056DBVT_C2868631.html
footprint SOT-23-6
pins: 1 VOSNS, 2 ZCD/CS, 3 VCC, 4 GND, 5 DRV, 6 COMP

## UCC28064ADR
designator U?
IC PFC CTR TRANS 45KHZ 16SOIC; Manufacturer: Texas Instruments; Manufacturer Part Number: UCC28064ADR; Supplier: Mouser; LCSC Part Number: C882391; RoHS: Yes; Item Type: IC; Stock: 4170; Pricing: 1=2.39, 10=2.15, 50=2.15, 100=1.73, 1000=1.17, 10000=1 (USD); ComponentLink1URL: http://www.ti.com/general/docs/suppproductinfo.tsp?distId=10&amp;gotoUrl=http%3A%2F%2Fwww.ti.com%2Flit%2Fgpn%2Fucc28064a&src-supplier=Digikey; ComponentLink1Description: http://www.ti.com/general/docs/suppproductinfo.tsp?distId=10&amp;gotoUrl=http%3A%2F%2Fwww.ti.com%2Flit%2Fgpn%2Fucc28064a&src-supplier=Digikey
footprint SOIC-16
pins: 1 ZCD_B, 2 VSENSE, 3 TSET, 4 PHB, 5 COMP, 6 AGND, 7 VINAC, 8 HVSEN, 9 BRST, 10 CS, 11 GDB, 12 VCC, 13 PGND, 14 GDA, 15 VREF, 16 ZCD_A

## UCC28180DR
designator U?
IC PFC CTRLR CCM 250KHZ 8SOIC; Manufacturer: Texas Instruments; Manufacturer Part Number: UCC28180DR; Supplier: Mouser; LCSC Part Number: C88567; RoHS: Yes; Item Type: IC; Stock: 6340; Pricing: 1=1.44, 10=1.29, 50=1.29, 100=1.01, 1000=0.66, 10000=0.563 (USD); ComponentLink1URL: https://datasheet.ciiva.com/24141/slusbq5a-317155-24141395.pdf?src-supplier=Mouser; ComponentLink1Description: https://datasheet.ciiva.com/24141/slusbq5a-317155-24141395.pdf?src-supplier=Mouser; ComponentLink2URL: https://datasheet.ciiva.com/29899/ucc28180-29899377.pdf?src-supplier=Avnet; ComponentLink2Description: https://datasheet.ciiva.com/29899/ucc28180-29899377.pdf?src-supplier=Avnet
footprint SOIC-8
pins: 1 GND, 2 ICOMP, 3 ISENSE, 4 FREQ, 5 VCOMP, 6 VSENSE, 7 VCC, 8 GATE

## UCC28740DR
designator U?
IC OFFLINE SWITCH FLYBACK 7SOIC; Manufacturer: Texas Instruments; Manufacturer Part Number: UCC28740DR; Supplier: Mouser; LCSC Part Number: C182073; RoHS: Yes; Item Type: IC; Stock: 12848; Pricing: 1=1.11, 10=0.8, 50=0.723, 100=0.638, 1000=0.532, 10000=0.496 (USD); Length: 4.9mm; Width: 3.91mm; Height: 1.75mm; Thickness: 1.58mm; Lead Free: 5697LeadFree; ComponentLink1URL: https://datasheet.ciiva.com/24018/slusbf3a-284800-24018902.pdf?src-supplier=Mouser; ComponentLink1Description: https://datasheet.ciiva.com/24018/slusbf3a-284800-24018902.pdf?src-supplier=Mouser; ComponentLink2URL: https://datasheet.ciiva.com/30018/ucc28740-30018278.pdf?src-supplier=Avnet; ComponentLink2Description: https://datasheet.ciiva.com/30018/ucc28740-30018278.pdf?src-supplier=Avnet; ComponentLink3URL: https://datasheet.ciiva.com/29610/ucc28740-29610346.pdf?src-supplier=Digikey; ComponentLink3Description: https://datasheet.ciiva.com/29610/ucc28740-29610346.pdf?src-supplier=Digikey
footprint 7-SOIC
pins: 1 VDD, 2 VS, 3 FB, 4 GND, 5 CS, 6 DRV, 7 HV

## UCC28951PWR
designator U?
PWR MGMT MOSFET/PWR DRIVER; Manufacturer: Texas Instruments; Manufacturer Part Number: UCC28951PWR; Item Type: IC; Output Configuration: Positive; Number of Outputs: 6; Number of Output Phases: 1; Switching Frequency: 1MHz; Max Duty Cycle: 95%; Synchronous Rectifier: Yes; Supplier: Mouser; LCSC Part Number: C1849524; RoHS: Yes; Stock: 2468; Pricing: 1=6.18, 10=4.19, 50=4.19, 100=3.75, 1000=3.27, 10000=2.88 (USD); Case/Package: TSSOP; Min Operating Temperature: -40°C; Max Operating Temperature: 125°C; Packaging: Tape and Reel; Clock Sync: Yes; Series: -; RoHS Compliant: Yes; ComponentLink1URL: http://www.ti.com/general/docs/suppproductinfo.tsp?distId=10&amp;gotoUrl=http%3A%2F%2Fwww.ti.com%2Flit%2Fgpn%2Fucc28951&src-supplier=Digikey; ComponentLink1Description: http://www.ti.com/general/docs/suppproductinfo.tsp?distId=10&amp;gotoUrl=http%3A%2F%2Fwww.ti.com%2Flit%2Fgpn%2Fucc28951&src-supplier=Digikey
footprint TSSOP-24
pins: 1 VREF, 2 EA+, 3 EA–, 4 COMP, 5 SS/EN, 6 DELAB, 7 DELCD, 8 DELEF, 9 TMIN, 10 RT, 11 RSUM, 12 DCM, 13 ADELEF, 14 ADEL, 15 CS, 16 SYNC, 17 OUTF, 18 OUTE, 19 OUTD, 20 OUTC, 21 OUTB, 22 OUTA, 23 VDD, 24 GND

## UCC256404DDBR
designator U?
HALF BRIDGE CONT WITH HV DRIVER; Manufacturer: Texas Instruments; Manufacturer Part Number: UCC256404DDBR; Item Type: IC; Supplier: Mouser; LCSC Part Number: C2867939; RoHS: Yes; Stock: 2756; Pricing: 1=2.34, 10=1.99, 50=1.99, 100=1.69, 1000=1.15, 10000=0.981 (USD); ComponentLink1URL: http://www.ti.com/general/docs/suppproductinfo.tsp?distId=10&amp;gotoUrl=http%3A%2F%2Fwww.ti.com%2Flit%2Fgpn%2Fucc256402&src-supplier=Digikey; ComponentLink1Description: http://www.ti.com/general/docs/suppproductinfo.tsp?distId=10&amp;gotoUrl=http%3A%2F%2Fwww.ti.com%2Flit%2Fgpn%2Fucc256402&src-supplier=Digikey
footprint UCC256404DDBR
pins: 1 HV, 3 VCC, 4 BLK, 5 FB, 6 ISNS, 7 VCR, 8 BW, 9 LL/SS, 10 LO, 11 GND, 12 RVCC, 14 HB, 15 HO, 16 HS

## UM1750S-00
designator U?
5V Input 350mA LDO; Manufacturer: Union Semiconductor; Manufacturer Part Number: UM1750S-00; Item Type: IC; Package: SOT-23-5; LCSC Part Number: C620011; ComponentLink1Description: LCSC; ComponentLink1URL: https://www.lcsc.com/product-detail/Linear-Voltage-Regulators-LDO_Union-Semiconductor-UM1750S-00_C620011.html
footprint SOT-23-5
pins: 1 IN, 2 GND, 3 ~{SHDN}, 4 FB, 5 OUT

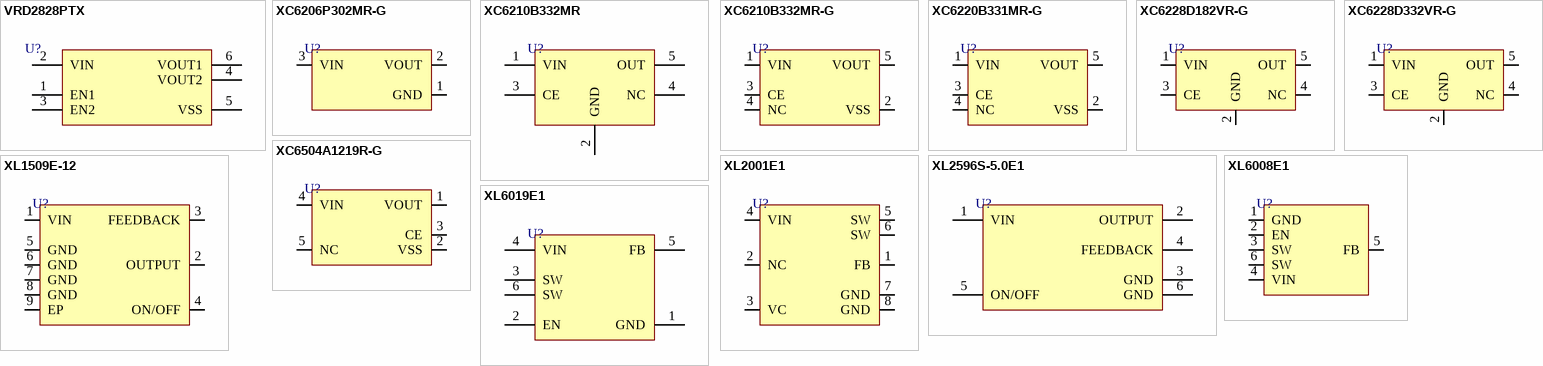
[diagram p6: symbols VRD2828PTX to XL6019E1]

## VRD2828PTX
designator U?
300mA 75dB@1kHz 10nA 90mV 2.8V~2.8V 2 6V SOT-23-6 Linear Voltage Regulators (LDO) ROHS; Manufacturer: AnaSem; Manufacturer Part Number: VRD2828PTX; Item Type: IC; Package: SOT-23-6; ComponentLink1Description: LCSC; ComponentLink1URL: https://lcsc.com/product-detail/Linear-Voltage-Regulators-LDO_AnaSem-VRD2828PTX_C697937.html; LCSC Part Number: C697937
footprint SOT-23-6
pins: 1 EN1, 2 VIN, 3 EN2, 4 VOUT2, 5 VSS, 6 VOUT1

## XC6206P302MR-G
designator U?
IC REG LINEAR 3V 200MA SOT23; Manufacturer: Torex; Manufacturer Part Number: XC6206P302MR-G; Number of Channels: 1NUMBER; Supplier: Mouser; LCSC Part Number: C9972; RoHS: Yes; Item Type: IC; Stock: 15826; Pricing: 1=0.68, 10=0.543, 50=0.543, 100=0.417, 1000=0.271, 10000=0.214 (USD); Output Voltage: 3V; ComponentLink1URL: https://www.torexsemi.com/file/xc6206/XC6206.pdf?src-supplier=Digikey; ComponentLink1Description: https://www.torexsemi.com/file/xc6206/XC6206.pdf?src-supplier=Digikey; ComponentLink2URL: https://datasheet.octopart.com/XC6206P302MR-G-Torex-datasheet-134531119.pdf?src-supplier=TME; ComponentLink2Description: https://datasheet.octopart.com/XC6206P302MR-G-Torex-datasheet-134531119.pdf?src-supplier=TME
footprint SOT-23 (TRANS NPN 40V 0.6A SOT23)
pins: 1 GND, 2 VOUT, 3 VIN

## XC6210B332MR
designator U?
SOT-23-5 Linear Voltage Regulators (LDO) ROHS; Manufacturer: TECH PUBLIC; Manufacturer Part Number: XC6210B332MR; Item Type: IC; Package: SOT-23-5; LCSC Part Number: C3021084; ComponentLink1Description: LCSC; ComponentLink1URL: https://www.lcsc.com/product-detail/Linear-Voltage-Regulators-LDO_TECH-PUBLIC-XC6210B332MR_C3021084.html
footprint Sot-23-5
pins: 1 VIN, 2 GND, 3 CE, 4 NC, 5 OUT

## XC6210B332MR-G
designator U?
700mA 60dB@(1kHz) Fixed 3.3V Positive electrode 6V SOT-25-5 Voltage Regulators - Linear, Low Drop Out (LDO) Regulators ROHS; Manufacturer: Torex Semicon; Manufacturer Part Number: XC6210B332MR-G; Item Type: IC; Package: SOT-25-5; LCSC Part Number: C47719; ComponentLink1Description: LCSC; ComponentLink1URL: https://www.lcsc.com/product-detail/Voltage-Regulators-Linear-Low-Drop-Out-LDO-Regulators_Torex-Semicon-XC6210B332MR-G_C47719.html?s_z=n_XC6210B332MR-G
footprint SOT-25-5
pins: 1 VIN, 2 VSS, 3 CE, 4 NC, 5 VOUT

## XC6220B331MR-G
designator U?
Linear Voltage Regulator IC Positive Fixed 1 Output 3.3V 1A SOT-25; Manufacturer: Torex; Manufacturer Part Number: XC6220B331MR-G; Dropout Voltage: 655mV; Min Input Voltage: 1.6V; Max Input Voltage: 6V; Number of Regulators: 1; Min Current Limit: 1.005A; Supplier 1: Newark; RoHS: Yes; Category: Voltage Regulators - Linear; Stock 1: 3078; Pricing 1: 1=1.20000, 10=1.08000, 100=0.83900, 500=0.69300, 1000=0.54800 (USD); Mount: Surface Mount; Case/Package: SOT-25; Number of Pins: 5; Min Operating Temperature: -40°C; Max Operating Temperature: 85°C; Package Quantity: 1; Packaging: Tape and Reel; Output Current: 1A; Output Voltage: 3.3V; Nominal Output Voltage: 3.3V; Output Type: Fixed; Series: -; REACH SVHC: No SVHC; RoHS Compliant: Yes; ComponentLink1URL: https://datasheet.ciiva.com/7992/610888-7992813.pdf?src-supplier=Element14; ComponentLink1Description: https://datasheet.ciiva.com/7992/610888-7992813.pdf?src-supplier=Element14; ComponentLink2URL: https://datasheet.ciiva.com/5755/610888-5755886.pdf?src-supplier=Farnell; ComponentLink2Description: https://datasheet.ciiva.com/5755/610888-5755886.pdf?src-supplier=Farnell; ComponentLink3URL: https://datasheet.ciiva.com/2040/xc6220-2040201.pdf?src-supplier=Digi-Key; ComponentLink3Description: https://datasheet.ciiva.com/2040/xc6220-2040201.pdf?src-supplier=Digi-Key; ComponentLink4URL: https://datasheet.ciiva.com/2040/xc6220-2040200.pdf?src-supplier=Digi-Key; ComponentLink4Description: https://datasheet.ciiva.com/2040/xc6220-2040200.pdf?src-supplier=Digi-Key; ComponentLink5URL: https://datasheet.ciiva.com/2040/xc6220-2040202.pdf?src-supplier=Digi-Key; ComponentLink5Description: https://datasheet.ciiva.com/2040/xc6220-2040202.pdf?src-supplier=Digi-Key; Supplier Part Number 1: 84R0738; LCSC Part Number: C86534; Item Type: IC
footprint SOT-25-5
pins: 1 VIN, 2 VSS, 3 CE, 4 NC, 5 VOUT

## XC6228D182VR-G
designator U?
300mA 80dB@(1kHz) 410mV@(300mA) Fixed 1.8V~1.8V Positive 1 5.5V SOT-25-5 Linear Voltage Regulators (LDO) ROHS; Manufacturer: Torex Semicon; Manufacturer Part Number: XC6228D182VR-G; Item Type: IC; Package: SOT-25-5; LCSC Part Number: C216644; ComponentLink1Description: LCSC; ComponentLink1URL: https://www.lcsc.com/product-detail/Linear-Voltage-Regulators-LDO_Torex-Semicon-XC6228D182VR-G_C216644.html
footprint SOT-25-5
pins: 1 VIN, 2 GND, 3 CE, 4 NC, 5 OUT

## XC6228D332VR-G
designator U?
300mA 80dB@(1kHz) 305mV@(300mA) Fixed 3.3V~3.3V Positive 1 5.5V SOT-25-5 Linear Voltage Regulators (LDO) ROHS; Manufacturer: Torex Semicon; Manufacturer Part Number: XC6228D332VR-G; Item Type: IC; Package: SOT-25-5; LCSC Part Number: C69841; ComponentLink1Description: LCSC; ComponentLink1URL: https://www.lcsc.com/product-detail/Linear-Voltage-Regulators-LDO_Torex-Semicon-XC6228D332VR-G_C69841.html
footprint SOT-25-5
pins: 1 VIN, 2 GND, 3 CE, 4 NC, 5 OUT

## XC6504A1219R-G
designator U?
IC REG LIN 1.2V 150MA USPQ-4B04; Manufacturer: Torex; Manufacturer Part Number: XC6504A1219R-G; Supplier: Digikey; LCSC Part Number: C216662; RoHS: No; Item Type: IC; Stock: 3000; Pricing: 1=0.74, 10=0.456, 25=0.38, 100=0.2939, 250=0.25156, 500=0.22552, 1000=0.20381 (USD); ComponentLink1URL: https://www.torexsemi.com/file/xc6504/XC6504.pdf?src-supplier=Digikey; ComponentLink1Description: https://www.torexsemi.com/file/xc6504/XC6504.pdf?src-supplier=Digikey
footprint USPQ-4B04(1x1)
pins: 1 VOUT, 2 VSS, 3 CE, 4 VIN, 5 NC

## XL1509E-12
designator U?
Step-down type Fixed 12V 2A 4.5V~40V ESOP-8 DC-DC Converters ROHS; Manufacturer: UMW; Manufacturer Part Number: XL1509E-12; Item Type: IC; Package: ESOP-8; LCSC Part Number: C5185875; ComponentLink1Description: LCSC; ComponentLink1URL: https://www.lcsc.com/product-detail/DC-DC-Converters_UMW-Youtai-Semiconductor-Co-Ltd-XL1509E-12_C5185875.html
footprint ESOP-8
pins: 1 VIN, 2 OUTPUT, 3 FEEDBACK, 4 ON/OFF, 5 GND, 6 GND, 7 GND, 8 GND, 9 EP

## XL2001E1
designator U?
Step-down type 5V 1.8A 8V~45V SOP-8 DC-DC Converters ROHS; Manufacturer: XLSEMI; Manufacturer Part Number: XL2001E1; Item Type: IC; Package: SOP-8; LCSC Part Number: C73336; ComponentLink1Description: LCSC; ComponentLink1URL: https://www.lcsc.com/product-detail/DC-DC-Converters_XLSEMI-XL2001E1_C73336.html
footprint SOP-8
pins: 1 FB, 2 NC, 3 VC, 4 VIN, 5 SW, 6 SW, 7 GND, 8 GND

## XL2596S-5.0E1
designator U?
Step-down type 5V 3A 4.5V~40V TO-263-5 DC-DC Converters ROHS; Manufacturer: XLSEMI; Manufacturer Part Number: XL2596S-5.0E1; Item Type: IC; Package: TO-263-5; LCSC Part Number: C74190; ComponentLink1Description: LCSC; ComponentLink1URL: https://www.lcsc.com/product-detail/DC-DC-Converters_XLSEMI-XL2596S-5-0E1_C74190.html
footprint TO-263-5 (D2PAK)
pins: 1 VIN, 2 OUTPUT, 3 GND, 4 FEEDBACK, 5 ON/OFF , 6 GND

## XL6008E1
designator U?
Buck-boost type 3.6V~32V 3A TO-252-5 DC-DC Converters ROHS; Manufacturer: XLSEMI; Manufacturer Part Number: XL6008E1; Item Type: IC; Package: TO-252-5; LCSC Part Number: C73012; ComponentLink1Description: LCSC; ComponentLink1URL: https://www.lcsc.com/product-detail/DC-DC-Converters_XLSEMI-XL6008E1_C73012.html
footprint TO-252-5
pins: 1 GND, 2 EN, 3 SW, 4 VIN, 5 FB, 6 SW

## XL6019E1
designator U?
NO boost converterType 1 Boost 60V 5V~40V 5A 220kHz TO-263-5 DC-DC Converters ROHS; Manufacturer: XLSEMI; Manufacturer Part Number: XL6019E1; Item Type: IC; Package: TO-263-5; LCSC Part Number: C73018; ComponentLink1Description: LCSC; ComponentLink1URL: https://www.lcsc.com/product-detail/DC-DC-Converters_XLSEMI-XL6019E1_C73018.html
footprint TO-263-5 (D2PAK)
pins: 1 GND, 2 EN, 3 SW, 4 VIN, 5 FB, 6 SW